# EAGLE library part INMP441-MODULE (library moto-anomaly)
INMP441-MODULE INMP441 I2S MEMS mikrofon karti (yuvarlak, 2x3 pin). Kart: 14.0 x 14.0 mm - Guven: M STEP: GrabCAD 'INMP441'
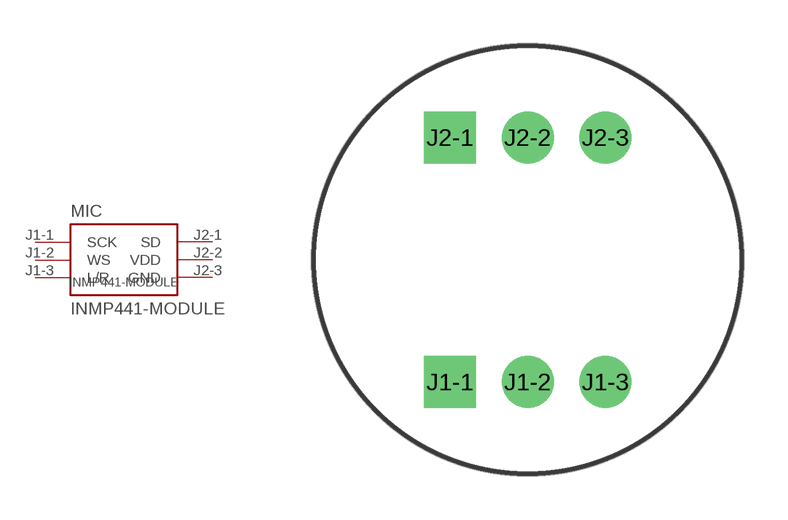
[diagram p0: symbol with the pads of INMP441-MODULE; footprint INMP441-MODULE]

Designator prefix MIC

## INMP441-MODULE (BOARD_SIZE: 14.0x14.0mm; CONFIDENCE: M)  [INMP441-MODULE]
J1-1  SCK  pas
J1-2  WS  pas
J1-3  L/R  pas
J2-1  SD  pas
J2-2  VDD  pas
J2-3  GND  pas

## Footprint INMP441-MODULE (pad centres in mm)
INMP441 I2S MEMS mikrofon karti (yuvarlak, 2x3 pin). | Kart: 14.0 x 14.0 mm | Guven: M
drill 1 pad 1.7 square: J1-1 -2.54,-4; J2-1 -2.54,4
drill 1 pad 1.7 round: J1-2 0,-4; J1-3 2.54,-4; J2-2 0,4; J2-3 2.54,4